# Altium footprint library PcbLib1.PcbLib: 7 footprints
Each footprint in its own frame and in the unit in brackets; x right, y up, seen from the top. Pads: shape width x height; smd on the part's side, far side on the other; paste and mask are expansions set on the pad; w line width, h text height; cw(c..) or ccw(c..) is an arc to the next point about the centre after c.
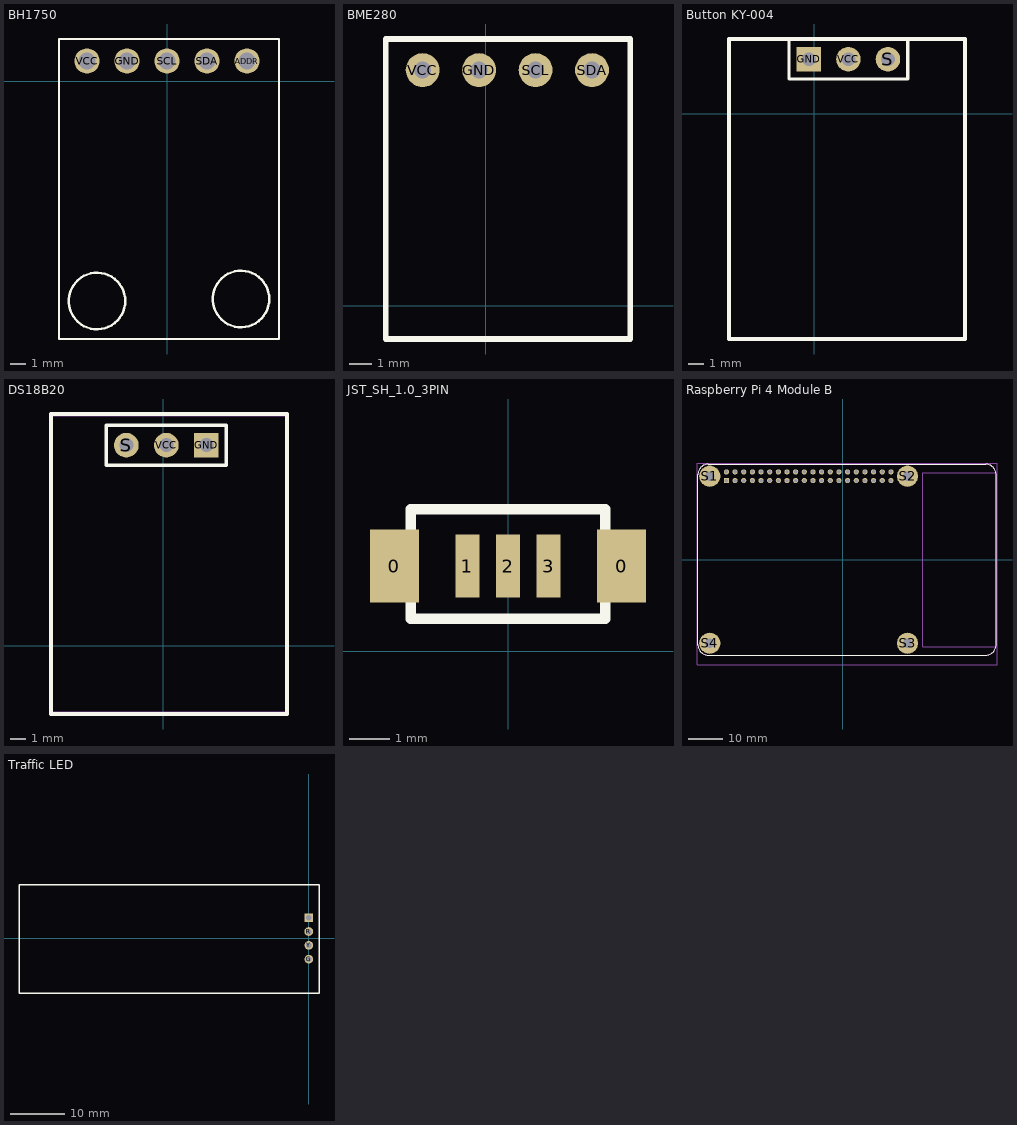
[diagram p0: the footprints below, top view; thin cyan lines are the x and y axes]

## BH1750 [mil]
pads (5):
  round 63 hole 42: ADDR(200,50) GND(-100,50) SCL(0,50) SDA(100,50) VCC(-200,50)
Top Overlay:
  circle w6: c-175,-550 r70.71
  circle w6: c185,-545 r70.71
  lines w6: -270,-645 280,-645 280,105 -270,105 -270,-645
3D body "BH1750_with_connector.STEP": height 350.65, standoff -108.91, extent -277.41,-640.37 277.41,98.43

## BME280 [mil]
pads (4):
  round 60 hole 30: GND(-11.81,417.32) SCL(88.19,417.32) SDA(188.19,417.32) VCC(-111.81,417.32)
Top Overlay:
  lines w10: -177.17,-59.06 255.91,-59.06 255.91,472.44 -177.17,472.44 -177.17,-59.06
3D body "BME Assemble.step": height 330.71, standoff -139.29, extent -171.26,-55.93 250,476.38

## Button KY-004 [mil]
pads (3):
  rect 62x62 hole 35 paste-99999 mask+4: GND(-12.99,137.8)
  round 62 hole 35 paste-99999 mask+4: S(187.01,137.8) VCC(87.01,137.8)
Top Overlay:
  lines w7.99: 12.01,187.8 237.01,187.8
  lines w8: 12.01,187.8 -62.99,187.8 -62.99,87.8 237.01,87.8 237.01,187.8
  lines w10: -215,-570 381.89,-570 381.89,-368.37 381.89,-12.66 381.89,188.98 -215,188.98 -215,-570
3D body "Button Assemble (Assembly).step": height 485.09, standoff -118.69, extent -212.85,-573.25 389.51,188.17

## DS18B20 [mil]
pads (3):
  rect 62x62 hole 35 paste-99999 mask+4: GND(107.09,501.02)
  round 62 hole 35 paste-99999 mask+4: S(-92.91,501.02) VCC(7.09,501.02)
Top Overlay:
  lines w7.99: -142.91,451.02 82.09,451.02
  lines w8: -142.91,451.02 -142.91,551.02 157.09,551.02 157.09,451.02 82.09,451.02
  lines w10: -280.91,-170.98 309.09,-170.98 309.09,579.02 -280.91,579.02 -280.91,-170.98
Mechanical 1:
  lines w10: -281.5,-170.28 309.06,-170.28 309.06,577.76 -281.5,577.76 -281.5,-170.28
3D body "KY-001 DS18B20 Module almost fixed 2.step": height 656.69, standoff -115.38, extent -299.21,-179.13 330.71,608.27

## JST_SH_1.0_3PIN [mm]
pads (5):
  rect 1.2x1.8 smd: 0(-2.8,2.1) 0(2.8,2.1)
  rect 0.6x1.55 smd: 1(-1,2.1) 2(0,2.1) 3(1,2.1)
Top Overlay:
  lines w0.254: -2.4,0.8 2.4,0.8 2.4,3.5 -2.4,3.5 -2.4,0.8

## Raspberry Pi 4 Module B [mil]
pads (44):
  rect 60x60 / inner round 60 / far side rect 60x60 hole 40 mask+4.02: 1(-1343.7,914.57)
  round 60 hole 40 mask+4.02: 2(-1343.7,1014.57) 3(-1243.7,914.57) 4(-1243.7,1014.57) 5(-1143.7,914.57) 6(-1143.7,1014.57) 7(-1043.7,914.57) 8(-1043.7,1014.57) 9(-943.7,914.57) 10(-943.7,1014.57) 11(-843.7,914.57) 12(-843.7,1014.57) 13(-743.7,914.57) 14(-743.7,1014.57) 15(-643.7,914.57) 16(-643.7,1014.57) 17(-543.7,914.57) 18(-543.7,1014.57) 19(-443.7,914.57) 20(-443.7,1014.57) 21(-343.7,914.57) 22(-343.7,1014.57) 23(-243.7,914.57) 24(-243.7,1014.57) 25(-143.7,914.57) 26(-143.7,1014.57) 27(-43.7,914.57) 28(-43.7,1014.57) 29(56.3,914.57) 30(56.3,1014.57) 31(156.3,914.57) 32(156.3,1014.57) 33(256.3,914.57) 34(256.3,1014.57) 35(356.3,914.57) 36(356.3,1014.57) 37(456.3,914.57) 38(456.3,1014.57) 39(556.3,914.57) 40(556.3,1014.57)
  round 244.09 hole 108.27 mask+4.02: S1(-1535.43,964.57) S2(748.03,964.57) S3(748.03,-964.57) S4(-1535.43,-964.57)
Top Overlay:
  lines w5: 1771.65,-984.25 cw(c1653.54,-984.25) 1653.54,-1102.36 1555.12,-1102.36 -1555.12,-1102.36 cw(c-1555.12,-984.25) -1673.23,-984.25 -1673.23,984.25 cw(c-1555.12,984.25) -1555.12,1102.36 1555.12,1102.36 1653.54,1102.36 cw(c1653.54,984.25) 1771.65,984.25 ; 1771.65,-984.25 1771.65,984.25 ; 1771.65,-984.25 1771.65,984.25
Mechanical 13:
  lines w5: 1555.12,-1102.36 -1555.12,-1102.36 cw(c-1555.12,-984.25) -1673.23,-984.25 -1673.23,984.25 cw(c-1555.12,984.25) -1555.12,1102.36 1555.12,1102.36 ; 1653.54,-1102.36 ccw(c1653.54,-984.25) 1771.65,-984.25 ; 1653.54,1102.36 cw(c1653.54,984.25) 1771.65,984.25 ; 925.2,-1003.94 1771.65,-1003.94 1771.65,1003.94 925.2,1003.94 925.2,-1003.94
Mechanical 15:
  lines w1.97: -1683.07,-1210.63 -1683.07,1112.2 1781.5,1112.2 1781.5,-1210.63 -1683.07,-1210.63
3D body "step_temp.STEP": height 688.98, standoff -78.74, extent -1673.23,-1181.1 1783.45,1102.36

## Traffic LED [mm]
pads (4):
  round 1.6 hole 1: G(0.013,-3.86) R(-0.013,1.22) Y(0.013,-1.32)
  rect 1.6x1.6 hole 1: GND(-0.013,3.76)
Top Overlay:
  lines w0.254: -53.35,-10.154 1.875,-10.154 1.875,9.846 -53.35,9.846 -53.35,-10.154
3D body "Traffic led (Assembly).step": height 20, standoff -2.64, extent -53.525,-10 1.475,10